# Altium integrated library HF115F_005-1HS3BF_610_.IntLib: 1 symbol
Pins are listed as number, name and electrical type; pins without a type are passive.

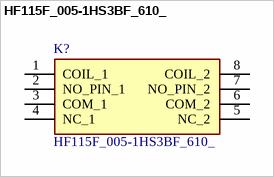
[diagram p0: symbol HF115F_005-1HS3BF_610_]

## HF115F_005-1HS3BF_610_
designator K?
5 Volt Coil, SPST-NO Contacts, Fully Sea, PK; Manufacturer_Name: Hongfa; Manufacturer_Part_Number: HF115F/005-1HS3BF(610); Geometry.Height: 16mm; Mouser Part Number: *; Mouser Price/Stock: *; Arrow Part Number: *; Arrow Price/Stock: *; Datasheet Link: https://docs.rs-online.com/df61/0900766b81663e8d.pdf
footprint HF115F0051HS3BF610
pins: 1 COIL_1, 2 NO_PIN_1, 3 COM_1, 4 NC_1, 5 NC_2, 6 COM_2, 7 NO_PIN_2, 8 COIL_2